# Altium footprint library LQFP.PcbLib: 18 footprints (part 1 of 2)
Each footprint in its own frame and in the unit in brackets; x right, y up, seen from the top. Pads: shape width x height; smd on the part's side, far side on the other; paste and mask are expansions set on the pad; w line width, h text height; cw(c..) or ccw(c..) is an arc to the next point about the centre after c.
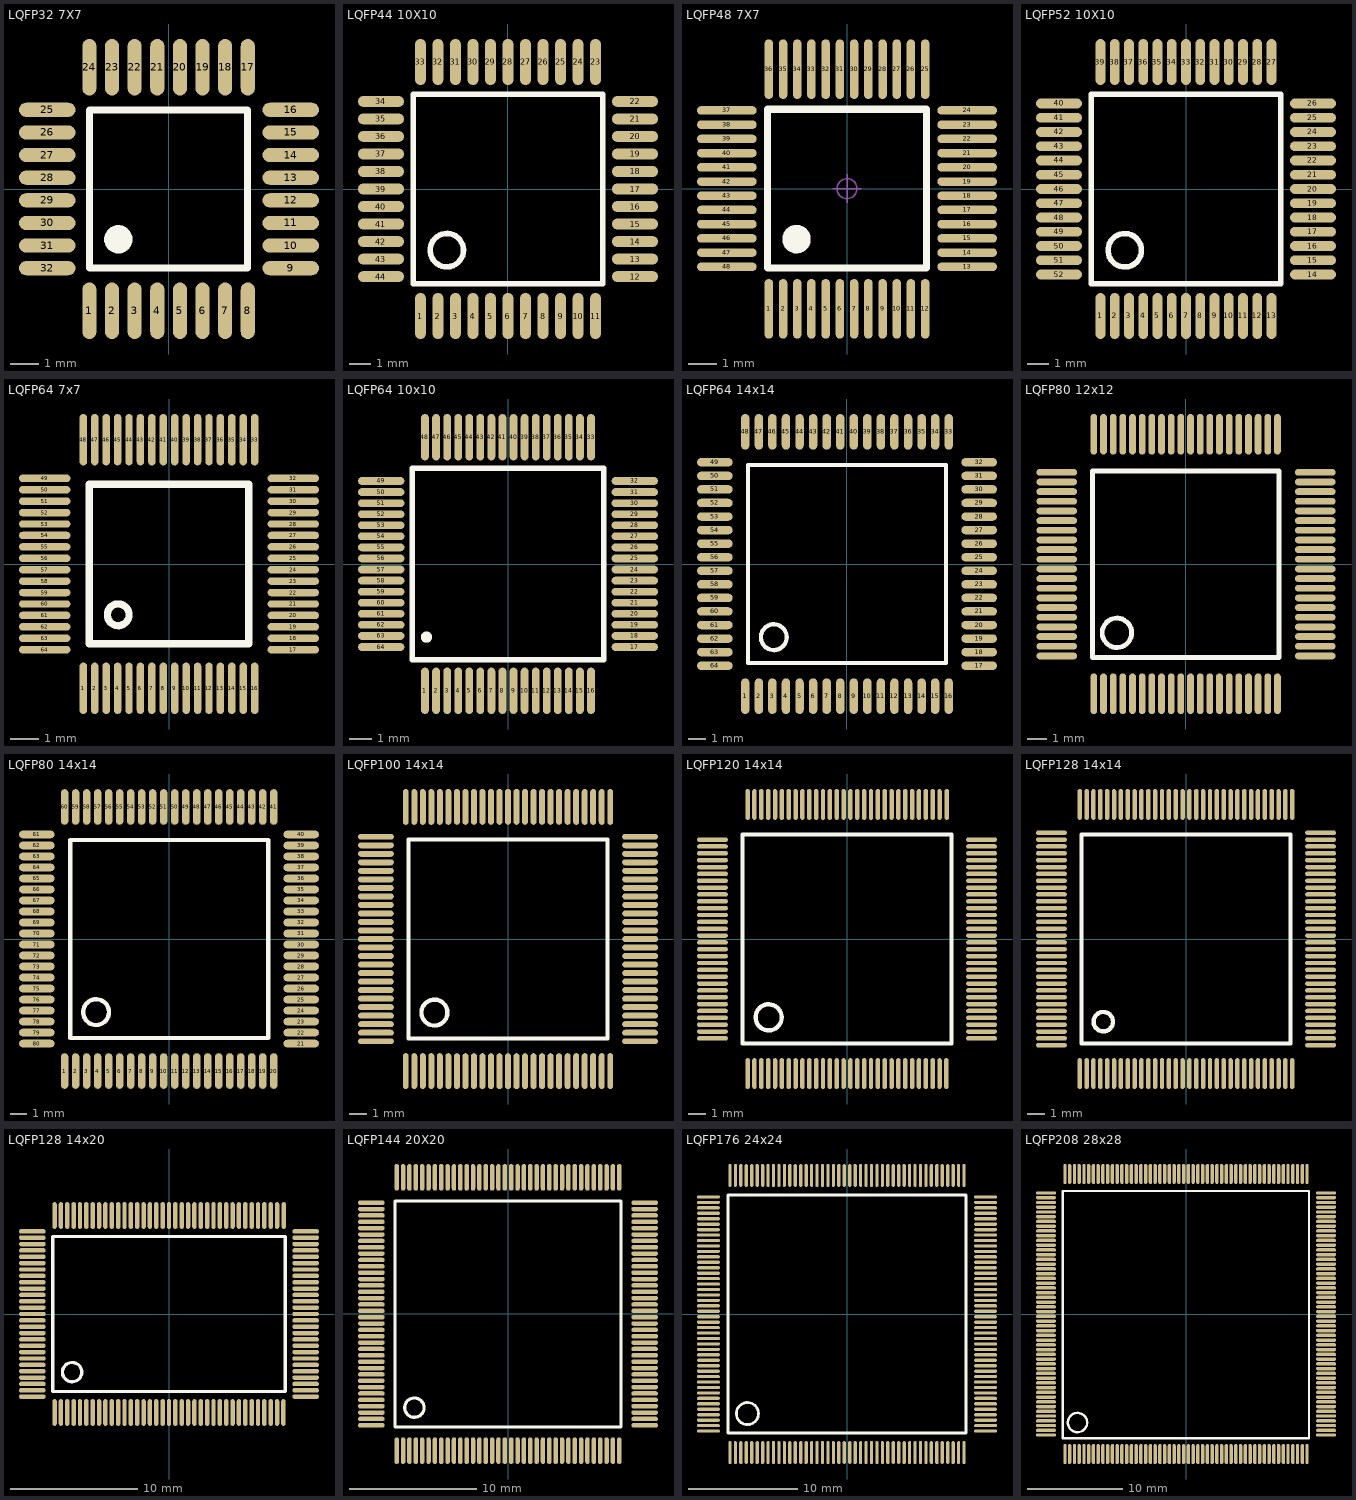
[diagram p0: the footprints below, top view; thin cyan lines are the x and y axes]

## LQFP32 7X7 [mm]
pads (32):
  oval 0.5x2 smd: 1(-2.8,-4.303) 2(-2,-4.303) 3(-1.2,-4.303) 4(-0.4,-4.303) 5(0.4,-4.303) 6(1.2,-4.303) 7(2,-4.303) 8(2.8,-4.303) 17(2.8,4.303) 18(2,4.303) 19(1.2,4.303) 20(0.4,4.303) 21(-0.4,4.303) 22(-1.2,4.303) 23(-2,4.303) 24(-2.8,4.303)
  oval 2x0.5 smd: 9(4.317,-2.8) 10(4.317,-2) 11(4.317,-1.2) 12(4.317,-0.4) 13(4.317,0.4) 14(4.317,1.2) 15(4.317,2) 16(4.317,2.8) 25(-4.289,2.8) 26(-4.289,2) 27(-4.289,1.2) 28(-4.289,0.4) 29(-4.289,-0.4) 30(-4.289,-1.2) 31(-4.289,-2) 32(-4.289,-2.8)
Top Overlay:
  circle w0.5: c-1.778,-1.778 r0.25
  lines w0.254: -2.794,-2.794 -2.794,2.794 2.794,2.794 2.794,-2.794 -2.794,-2.794
3D body "LQFP32 7X7.STEP": height 1.45, standoff 0, extent -4.51,-4.503 4.496,4.503

## LQFP44 10X10 [mm]
pads (44):
  oval 0.5x2.1 smd: 1(-4,-5.8) 2(-3.2,-5.8) 3(-2.4,-5.8) 4(-1.6,-5.8) 5(-0.8,-5.8) 6(0,-5.8) 7(0.8,-5.8) 8(1.6,-5.8) 9(2.4,-5.8) 10(3.2,-5.8) 11(4,-5.8) 23(4,5.8) 24(3.2,5.8) 25(2.4,5.8) 26(1.6,5.8) 27(0.8,5.8) 28(0,5.8) 29(-0.8,5.8) 30(-1.6,5.8) 31(-2.4,5.8) 32(-3.2,5.8) 33(-4,5.8)
  oval 2.1x0.5 smd: 12(5.8,-4) 13(5.8,-3.2) 14(5.8,-2.4) 15(5.8,-1.6) 16(5.8,-0.8) 17(5.8,0) 18(5.8,0.8) 19(5.8,1.6) 20(5.8,2.4) 21(5.8,3.2) 22(5.8,4) 34(-5.8,4) 35(-5.8,3.2) 36(-5.8,2.4) 37(-5.8,1.6) 38(-5.8,0.8) 39(-5.8,0) 40(-5.8,-0.8) 41(-5.8,-1.6) 42(-5.8,-2.4) 43(-5.8,-3.2) 44(-5.8,-4)
Top Overlay:
  circle w0.254: c-2.794,-2.794 r0.762
  lines w0.254: -4.318,-4.318 4.318,-4.318 4.318,4.318 -4.318,4.318 -4.318,-4.318
3D body "LQFP44 10X10.STEP": height 1.45, standoff 0, extent -5.986,-6.003 6.02,6.003

## LQFP48 7X7 [mm]
pads (48):
  oval 0.3x2.1 smd: 1(-2.75,-4.227) 2(-2.25,-4.227) 3(-1.75,-4.227) 4(-1.25,-4.227) 5(-0.75,-4.227) 6(-0.25,-4.227) 7(0.25,-4.227) 8(0.75,-4.227) 9(1.25,-4.227) 10(1.75,-4.227) 11(2.25,-4.227) 12(2.75,-4.227) 25(2.75,4.202) 26(2.25,4.202) 27(1.75,4.202) 28(1.25,4.202) 29(0.75,4.202) 30(0.25,4.202) 31(-0.25,4.202) 32(-0.75,4.202) 33(-1.25,4.202) 34(-1.75,4.202) 35(-2.25,4.202) 36(-2.75,4.202)
  oval 2.1x0.3 smd: 13(4.227,-2.75) 14(4.227,-2.25) 15(4.227,-1.75) 16(4.227,-1.25) 17(4.227,-0.75) 18(4.227,-0.25) 19(4.227,0.25) 20(4.227,0.75) 21(4.227,1.25) 22(4.227,1.75) 23(4.227,2.25) 24(4.227,2.75) 37(-4.227,2.75) 38(-4.227,2.25) 39(-4.227,1.75) 40(-4.227,1.25) 41(-4.227,0.75) 42(-4.227,0.25) 43(-4.227,-0.25) 44(-4.227,-0.75) 45(-4.227,-1.25) 46(-4.227,-1.75) 47(-4.227,-2.25) 48(-4.227,-2.75)
Top Overlay:
  circle w0.5: c-1.778,-1.778 r0.25
  lines w0.254: -2.794,-2.794 2.794,-2.794 2.794,2.794 -2.794,2.794 -2.794,-2.794
Mechanical 15:
  circle w0.05: c0,0 r0.35
  lines w0.05: -0.5,0 0.5,0 ; 0,-0.5 0,0.5
3D body "LQFP48 7X7.STEP": height 1.45, standoff 0, extent -4.51,-4.503 4.496,4.503

## LQFP52 10X10 [mm]
pads (52):
  oval 0.45x2.1 smd: 1(-3.9,-5.791) 2(-3.25,-5.791) 3(-2.6,-5.791) 4(-1.95,-5.791) 5(-1.3,-5.791) 6(-0.65,-5.791) 7(0,-5.791) 8(0.65,-5.791) 9(1.3,-5.791) 10(1.95,-5.791) 11(2.6,-5.791) 12(3.25,-5.791) 13(3.9,-5.791) 27(3.9,5.791) 28(3.25,5.791) 29(2.6,5.791) 30(1.95,5.791) 31(1.3,5.791) 32(0.65,5.791) 33(0,5.791) 34(-0.65,5.791) 35(-1.3,5.791) 36(-1.95,5.791) 37(-2.6,5.791) 38(-3.25,5.791) 39(-3.9,5.791)
  oval 2.1x0.45 smd: 14(5.791,-3.9) 15(5.791,-3.25) 16(5.791,-2.6) 17(5.791,-1.95) 18(5.791,-1.3) 19(5.791,-0.65) 20(5.791,0) 21(5.791,0.65) 22(5.791,1.3) 23(5.791,1.95) 24(5.791,2.6) 25(5.791,3.25) 26(5.791,3.9) 40(-5.791,3.9) 41(-5.791,3.25) 42(-5.791,2.6) 43(-5.791,1.95) 44(-5.791,1.3) 45(-5.791,0.65) 46(-5.791,0) 47(-5.791,-0.65) 48(-5.791,-1.3) 49(-5.791,-1.95) 50(-5.791,-2.6) 51(-5.791,-3.25) 52(-5.791,-3.9)
Top Overlay:
  circle w0.254: c-2.794,-2.794 r0.762
  lines w0.254: -4.318,-4.318 4.318,-4.318 4.318,4.318 -4.318,4.318 -4.318,-4.318
3D body "LQFP52 10X10.STEP": height 1.45, standoff 0, extent -5.986,-6.028 6.02,5.977

## LQFP64 7x7 [mm]
pads (64):
  oval 0.26x1.8 smd: 1(-3,-4.352) 2(-2.6,-4.352) 3(-2.2,-4.352) 4(-1.8,-4.352) 5(-1.4,-4.352) 6(-1,-4.352) 7(-0.6,-4.352) 8(-0.2,-4.352) 9(0.2,-4.352) 10(0.6,-4.352) 11(1,-4.352) 12(1.4,-4.352) 13(1.8,-4.352) 14(2.2,-4.352) 15(2.6,-4.352) 16(3,-4.352) 33(3,4.352) 34(2.6,4.352) 35(2.2,4.352) 36(1.8,4.352) 37(1.4,4.352) 38(1,4.352) 39(0.6,4.352) 40(0.2,4.352) 41(-0.2,4.352) 42(-0.6,4.352) 43(-1,4.352) 44(-1.4,4.352) 45(-1.8,4.352) 46(-2.2,4.352) 47(-2.6,4.352) 48(-3,4.352)
  oval 1.8x0.26 smd: 17(4.352,-3) 18(4.352,-2.6) 19(4.352,-2.2) 20(4.352,-1.8) 21(4.352,-1.4) 22(4.352,-1) 23(4.352,-0.6) 24(4.352,-0.2) 25(4.352,0.2) 26(4.352,0.6) 27(4.352,1) 28(4.352,1.4) 29(4.352,1.8) 30(4.352,2.2) 31(4.352,2.6) 32(4.352,3) 49(-4.352,3) 50(-4.352,2.6) 51(-4.352,2.2) 52(-4.352,1.8) 53(-4.352,1.4) 54(-4.352,1) 55(-4.352,0.6) 56(-4.352,0.2) 57(-4.352,-0.2) 58(-4.352,-0.6) 59(-4.352,-1) 60(-4.352,-1.4) 61(-4.352,-1.8) 62(-4.352,-2.2) 63(-4.352,-2.6) 64(-4.352,-3)
Top Overlay:
  circle w0.254: c-1.778,-1.778 r0.381
  lines w0.254: -2.794,-2.794 -2.794,2.794 2.794,2.794 2.794,-2.794 -2.794,-2.794
3D body "LQFP64 7x7.STEP": height 1.45, standoff 0, extent -4.51,-4.503 4.496,4.503

## LQFP64 10x10 [mm]
pads (64):
  oval 0.35x2.1 smd: 1(-3.75,-5.727) 2(-3.25,-5.727) 3(-2.75,-5.727) 4(-2.25,-5.727) 5(-1.75,-5.727) 6(-1.25,-5.727) 7(-0.75,-5.727) 8(-0.25,-5.727) 9(0.25,-5.727) 10(0.75,-5.727) 11(1.25,-5.727) 12(1.75,-5.727) 13(2.25,-5.727) 14(2.75,-5.727) 15(3.25,-5.727) 16(3.75,-5.727) 33(3.75,5.727) 34(3.25,5.727) 35(2.75,5.727) 36(2.25,5.727) 37(1.75,5.727) 38(1.25,5.727) 39(0.75,5.727) 40(0.25,5.727) 41(-0.25,5.727) 42(-0.75,5.727) 43(-1.25,5.727) 44(-1.75,5.727) 45(-2.25,5.727) 46(-2.75,5.727) 47(-3.25,5.727) 48(-3.75,5.727)
  oval 2.1x0.35 smd: 17(5.727,-3.75) 18(5.727,-3.25) 19(5.727,-2.75) 20(5.727,-2.25) 21(5.727,-1.75) 22(5.727,-1.25) 23(5.727,-0.75) 24(5.727,-0.25) 25(5.727,0.25) 26(5.727,0.75) 27(5.727,1.25) 28(5.727,1.75) 29(5.727,2.25) 30(5.727,2.75) 31(5.727,3.25) 32(5.727,3.75) 49(-5.727,3.75) 50(-5.727,3.25) 51(-5.727,2.75) 52(-5.727,2.25) 53(-5.727,1.75) 54(-5.727,1.25) 55(-5.727,0.75) 56(-5.727,0.25) 57(-5.727,-0.25) 58(-5.727,-0.75) 59(-5.727,-1.25) 60(-5.727,-1.75) 61(-5.727,-2.25) 62(-5.727,-2.75) 63(-5.727,-3.25) 64(-5.727,-3.75)
Top Overlay:
  circle w0.254: c-3.683,-3.302 r0.127
  lines w0.254: -4.318,-4.318 -4.318,4.318 4.318,4.318 4.318,-4.318 -4.318,-4.318
3D body "LQFP64 10x10.STEP": height 1.45, standoff 0, extent -6.003,-5.986 6.003,6.02

## LQFP64 14x14 [mm]
pads (64):
  oval 0.5x2.1 smd: 1(-6,-7.799) 2(-5.2,-7.799) 3(-4.4,-7.799) 4(-3.6,-7.799) 5(-2.8,-7.799) 6(-2,-7.799) 7(-1.2,-7.799) 8(-0.4,-7.799) 9(0.4,-7.799) 10(1.2,-7.799) 11(2,-7.799) 12(2.8,-7.799) 13(3.6,-7.799) 14(4.4,-7.799) 15(5.2,-7.799) 16(6,-7.799) 33(6,7.799) 34(5.2,7.799) 35(4.4,7.799) 36(3.6,7.799) 37(2.8,7.799) 38(2,7.799) 39(1.2,7.799) 40(0.4,7.799) 41(-0.4,7.799) 42(-1.2,7.799) 43(-2,7.799) 44(-2.8,7.799) 45(-3.6,7.799) 46(-4.4,7.799) 47(-5.2,7.799) 48(-6,7.799)
  oval 2.1x0.5 smd: 17(7.799,-6) 18(7.799,-5.2) 19(7.799,-4.4) 20(7.799,-3.6) 21(7.799,-2.8) 22(7.799,-2) 23(7.799,-1.2) 24(7.799,-0.4) 25(7.799,0.4) 26(7.799,1.2) 27(7.799,2) 28(7.799,2.8) 29(7.799,3.6) 30(7.799,4.4) 31(7.799,5.2) 32(7.799,6) 49(-7.799,6) 50(-7.799,5.2) 51(-7.799,4.4) 52(-7.799,3.6) 53(-7.799,2.8) 54(-7.799,2) 55(-7.799,1.2) 56(-7.799,0.4) 57(-7.799,-0.4) 58(-7.799,-1.2) 59(-7.799,-2) 60(-7.799,-2.8) 61(-7.799,-3.6) 62(-7.799,-4.4) 63(-7.799,-5.2) 64(-7.799,-6)
Top Overlay:
  circle w0.254: c-4.318,-4.318 r0.762
  lines w0.254: -5.842,-5.842 -5.842,5.842 5.842,5.842 5.842,-5.842 -5.842,-5.842
3D body "LQFP64 14x14.STEP": height 1.45, standoff 0, extent -8.005,-8.03 8.001,7.976

## LQFP80 12x12 [mm]
pads (80):
  oval 0.35x2.1 smd: 1(-4.75,-6.706) 2(-4.25,-6.706) 3(-3.75,-6.706) 4(-3.25,-6.706) 5(-2.75,-6.706) 6(-2.25,-6.706) 7(-1.75,-6.706) 8(-1.25,-6.706) 9(-0.75,-6.706) 10(-0.25,-6.706) 11(0.25,-6.706) 12(0.75,-6.706) 13(1.25,-6.706) 14(1.75,-6.706) 15(2.25,-6.706) 16(2.75,-6.706) 17(3.25,-6.706) 18(3.75,-6.706) 19(4.25,-6.706) 20(4.75,-6.706) 41(4.75,6.717) 42(4.25,6.717) 43(3.75,6.717) 44(3.25,6.717) 45(2.75,6.717) 46(2.25,6.717) 47(1.75,6.717) 48(1.25,6.717) 49(0.75,6.717) 50(0.25,6.717) 51(-0.25,6.717) 52(-0.75,6.717) 53(-1.25,6.717) 54(-1.75,6.717) 55(-2.25,6.717) 56(-2.75,6.717) 57(-3.25,6.717) 58(-3.75,6.717) 59(-4.25,6.717) 60(-4.75,6.717)
  oval 2.1x0.35 smd: 21(6.706,-4.75) 22(6.706,-4.25) 23(6.706,-3.75) 24(6.706,-3.25) 25(6.706,-2.75) 26(6.706,-2.25) 27(6.706,-1.75) 28(6.706,-1.25) 29(6.706,-0.75) 30(6.706,-0.25) 31(6.706,0.25) 32(6.706,0.75) 33(6.706,1.25) 34(6.706,1.75) 35(6.706,2.25) 36(6.706,2.75) 37(6.706,3.25) 38(6.706,3.75) 39(6.706,4.25) 40(6.706,4.75) 61(-6.67,4.75) 62(-6.67,4.25) 63(-6.67,3.75) 64(-6.67,3.25) 65(-6.67,2.75) 66(-6.67,2.25) 67(-6.67,1.75) 68(-6.67,1.25) 69(-6.67,0.75) 70(-6.67,0.25) 71(-6.67,-0.25) 72(-6.67,-0.75) 73(-6.67,-1.25) 74(-6.67,-1.75) 75(-6.67,-2.25) 76(-6.67,-2.75) 77(-6.67,-3.25) 78(-6.67,-3.75) 79(-6.67,-4.25) 80(-6.67,-4.75)
Top Overlay:
  circle w0.254: c-3.556,-3.556 r0.762
  lines w0.254: -4.826,-4.826 4.826,-4.826 4.826,4.826 -4.826,4.826 -4.826,-4.826
3D body "LQFP80 12x12.STEP": height 1.45, standoff 0, extent -7.003,-6.995 7.003,7.01

## LQFP80 14x14 [mm]
pads (80):
  oval 0.45x2.1 smd: 1(-6.175,-7.797) 2(-5.525,-7.797) 3(-4.875,-7.797) 4(-4.225,-7.797) 5(-3.575,-7.797) 6(-2.925,-7.797) 7(-2.275,-7.797) 8(-1.625,-7.797) 9(-0.975,-7.797) 10(-0.325,-7.797) 11(0.325,-7.797) 12(0.975,-7.797) 13(1.625,-7.797) 14(2.275,-7.797) 15(2.925,-7.797) 16(3.575,-7.797) 17(4.225,-7.797) 18(4.875,-7.797) 19(5.525,-7.797) 20(6.175,-7.797) 41(6.175,7.797) 42(5.525,7.797) 43(4.875,7.797) 44(4.225,7.797) 45(3.575,7.797) 46(2.925,7.797) 47(2.275,7.797) 48(1.625,7.797) 49(0.975,7.797) 50(0.325,7.797) 51(-0.325,7.797) 52(-0.975,7.797) 53(-1.625,7.797) 54(-2.275,7.797) 55(-2.925,7.797) 56(-3.575,7.797) 57(-4.225,7.797) 58(-4.875,7.797) 59(-5.525,7.797) 60(-6.175,7.797)
  oval 2.1x0.45 smd: 21(7.797,-6.175) 22(7.797,-5.525) 23(7.797,-4.875) 24(7.797,-4.225) 25(7.797,-3.575) 26(7.797,-2.925) 27(7.797,-2.275) 28(7.797,-1.625) 29(7.797,-0.975) 30(7.797,-0.325) 31(7.797,0.325) 32(7.797,0.975) 33(7.797,1.625) 34(7.797,2.275) 35(7.797,2.925) 36(7.797,3.575) 37(7.797,4.225) 38(7.797,4.875) 39(7.797,5.525) 40(7.797,6.175) 61(-7.822,6.175) 62(-7.822,5.525) 63(-7.822,4.875) 64(-7.822,4.225) 65(-7.822,3.575) 66(-7.822,2.925) 67(-7.822,2.275) 68(-7.822,1.625) 69(-7.822,0.975) 70(-7.822,0.325) 71(-7.822,-0.325) 72(-7.822,-0.975) 73(-7.822,-1.625) 74(-7.822,-2.275) 75(-7.822,-2.925) 76(-7.822,-3.575) 77(-7.822,-4.225) 78(-7.822,-4.875) 79(-7.822,-5.525) 80(-7.822,-6.175)
Top Overlay:
  circle w0.254: c-4.318,-4.318 r0.762
  lines w0.254: -5.842,-5.842 -5.842,5.842 5.842,5.842 5.842,-5.842 -5.842,-5.842
3D body "LQFP80 14x14.STEP": height 1.45, standoff 0, extent -8.001,-8.005 8.005,8.001

## LQFP100 14x14 [mm]
pads (100):
  oval 0.35x2.1 smd: 1(-6,-7.747) 2(-5.5,-7.747) 3(-5,-7.747) 4(-4.5,-7.747) 5(-4,-7.747) 6(-3.5,-7.747) 7(-3,-7.747) 8(-2.5,-7.747) 9(-2,-7.747) 10(-1.5,-7.747) 11(-1,-7.747) 12(-0.5,-7.747) 13(0,-7.747) 14(0.5,-7.747) 15(1,-7.747) 16(1.5,-7.747) 17(2,-7.747) 18(2.5,-7.747) 19(3,-7.747) 20(3.5,-7.747) 21(4,-7.747) 22(4.5,-7.747) 23(5,-7.747) 24(5.5,-7.747) 25(6,-7.747) 51(6,7.758) 52(5.5,7.758) 53(5,7.758) 54(4.5,7.758) 55(4,7.758) 56(3.5,7.758) 57(3,7.758) 58(2.5,7.758) 59(2,7.758) 60(1.5,7.758) 61(1,7.758) 62(0.5,7.758) 63(0,7.758) 64(-0.5,7.758) 65(-1,7.758) 66(-1.5,7.758) 67(-2,7.758) 68(-2.5,7.758) 69(-3,7.758) 70(-3.5,7.758) 71(-4,7.758) 72(-4.5,7.758) 73(-5,7.758) 74(-5.5,7.758) 75(-6,7.758)
  oval 2.1x0.35 smd: 26(7.752,-5.994) 27(7.752,-5.494) 28(7.752,-4.994) 29(7.752,-4.494) 30(7.752,-3.994) 31(7.752,-3.494) 32(7.752,-2.994) 33(7.752,-2.494) 34(7.752,-1.994) 35(7.752,-1.494) 36(7.752,-0.994) 37(7.752,-0.494) 38(7.752,0.006) 39(7.752,0.506) 40(7.752,1.006) 41(7.752,1.506) 42(7.752,2.006) 43(7.752,2.506) 44(7.752,3.006) 45(7.752,3.506) 46(7.752,4.006) 47(7.752,4.506) 48(7.752,5.006) 49(7.752,5.506) 50(7.752,6.006) 76(-7.752,6.006) 77(-7.752,5.506) 78(-7.752,5.006) 79(-7.752,4.506) 80(-7.752,4.006) 81(-7.752,3.506) 82(-7.752,3.006) 83(-7.752,2.506) 84(-7.752,2.006) 85(-7.752,1.506) 86(-7.752,1.006) 87(-7.752,0.506) 88(-7.752,0.006) 89(-7.752,-0.494) 90(-7.752,-0.994) 91(-7.752,-1.494) 92(-7.752,-1.994) 93(-7.752,-2.494) 94(-7.752,-2.994) 95(-7.752,-3.494) 96(-7.752,-3.994) 97(-7.752,-4.494) 98(-7.752,-4.994) 99(-7.752,-5.494) 100(-7.752,-5.994)
Top Overlay:
  circle w0.254: c-4.318,-4.312 r0.762
  lines w0.254: -5.842,-5.836 -5.842,5.848 5.842,5.848 5.842,-5.836 -5.842,-5.836
3D body "LQFP100 14x14.STEP": height 1.45, standoff 0, extent -8.001,-7.979 8.005,8.026

## LQFP120 14x14 [mm]
pads (120):
  oval 0.26x1.8 smd: 1(-5.8,-7.854) 2(-5.4,-7.854) 3(-5,-7.854) 4(-4.6,-7.854) 5(-4.2,-7.854) 6(-3.8,-7.854) 7(-3.4,-7.854) 8(-3,-7.854) 9(-2.6,-7.854) 10(-2.2,-7.854) 11(-1.8,-7.854) 12(-1.4,-7.854) 13(-1,-7.854) 14(-0.6,-7.854) 15(-0.2,-7.854) 16(0.2,-7.854) 17(0.6,-7.854) 18(1,-7.854) 19(1.4,-7.854) 20(1.8,-7.854) 21(2.2,-7.854) 22(2.6,-7.854) 23(3,-7.854) 24(3.4,-7.854) 25(3.8,-7.854) 26(4.2,-7.854) 27(4.6,-7.854) 28(5,-7.854) 29(5.4,-7.854) 30(5.8,-7.854) 61(5.825,7.854) 62(5.4,7.854) 63(5,7.854) 64(4.6,7.854) 65(4.2,7.854) 66(3.8,7.854) 67(3.4,7.854) 68(3,7.854) 69(2.6,7.854) 70(2.2,7.854) 71(1.8,7.854) 72(1.4,7.854) 73(1,7.854) 74(0.6,7.854) 75(0.2,7.854) 76(-0.2,7.854) 77(-0.6,7.854) 78(-1,7.854) 79(-1.4,7.854) 80(-1.8,7.854) 81(-2.2,7.854) 82(-2.6,7.854) 83(-3,7.854) 84(-3.4,7.854) 85(-3.8,7.854) 86(-4.2,7.854) 87(-4.6,7.854) 88(-5,7.854) 89(-5.4,7.854) 90(-5.8,7.854)
  oval 1.8x0.26 smd: 31(7.854,-5.8) 32(7.854,-5.4) 33(7.854,-5) 34(7.854,-4.6) 35(7.854,-4.2) 36(7.854,-3.8) 37(7.854,-3.4) 38(7.854,-3) 39(7.854,-2.6) 40(7.854,-2.2) 41(7.854,-1.8) 42(7.854,-1.4) 43(7.854,-1) 44(7.854,-0.6) 45(7.854,-0.2) 46(7.854,0.2) 47(7.854,0.6) 48(7.854,1) 49(7.854,1.4) 50(7.854,1.8) 51(7.854,2.2) 52(7.854,2.6) 53(7.854,3) 54(7.854,3.4) 55(7.854,3.8) 56(7.854,4.2) 57(7.854,4.6) 58(7.854,5) 59(7.854,5.4) 60(7.854,5.8) 91(-7.854,5.8) 92(-7.854,5.4) 93(-7.854,5) 94(-7.854,4.6) 95(-7.854,4.2) 96(-7.854,3.8) 97(-7.854,3.4) 98(-7.854,3) 99(-7.854,2.6) 100(-7.854,2.2) 101(-7.854,1.8) 102(-7.854,1.4) 103(-7.854,1) 104(-7.854,0.6) 105(-7.854,0.2) 106(-7.854,-0.2) 107(-7.854,-0.6) 108(-7.854,-1) 109(-7.854,-1.4) 110(-7.854,-1.8) 111(-7.854,-2.2) 112(-7.854,-2.6) 113(-7.854,-3) 114(-7.854,-3.4) 115(-7.854,-3.8) 116(-7.854,-4.2) 117(-7.854,-4.6) 118(-7.854,-5) 119(-7.854,-5.4) 120(-7.854,-5.8)
Top Overlay:
  circle w0.254: c-4.572,-4.572 r0.762
  lines w0.254: -6.096,-6.096 6.096,-6.096 6.096,6.096 -6.096,6.096 -6.096,-6.096
3D body "LQFP120 14x14.STEP": height 1.45, standoff 0, extent -8.001,-8.005 8.005,8.001

## LQFP128 14x14 [mm]
pads (128):
  oval 0.26x1.8 smd: 1(-6.2,-7.854) 2(-5.8,-7.854) 3(-5.4,-7.854) 4(-5,-7.854) 5(-4.6,-7.854) 6(-4.2,-7.854) 7(-3.8,-7.854) 8(-3.4,-7.854) 9(-3,-7.854) 10(-2.6,-7.854) 11(-2.2,-7.854) 12(-1.8,-7.854) 13(-1.4,-7.854) 14(-1,-7.854) 15(-0.6,-7.854) 16(-0.2,-7.854) 17(0.2,-7.854) 18(0.6,-7.854) 19(1,-7.854) 20(1.4,-7.854) 21(1.8,-7.854) 22(2.2,-7.854) 23(2.6,-7.854) 24(3,-7.854) 25(3.4,-7.854) 26(3.8,-7.854) 27(4.2,-7.854) 28(4.6,-7.854) 29(5,-7.854) 30(5.4,-7.854) 31(5.8,-7.854) 32(6.2,-7.854) 65(6.2,7.854) 66(5.8,7.854) 67(5.4,7.854) 68(5,7.854) 69(4.6,7.854) 70(4.2,7.854) 71(3.8,7.854) 72(3.4,7.854) 73(3,7.854) 74(2.6,7.854) 75(2.2,7.854) 76(1.8,7.854) 77(1.4,7.854) 78(1,7.854) 79(0.6,7.854) 80(0.2,7.854) 81(-0.2,7.854) 82(-0.6,7.854) 83(-1,7.854) 84(-1.4,7.854) 85(-1.8,7.854) 86(-2.2,7.854) 87(-2.6,7.854) 88(-3,7.854) 89(-3.4,7.854) 90(-3.8,7.854) 91(-4.2,7.854) 92(-4.6,7.854) 93(-5,7.854) 94(-5.4,7.854) 95(-5.8,7.854) 96(-6.2,7.854)
  oval 1.8x0.26 smd: 33(7.854,-6.2) 34(7.854,-5.8) 35(7.854,-5.4) 36(7.854,-5) 37(7.854,-4.6) 38(7.854,-4.2) 39(7.854,-3.8) 40(7.854,-3.4) 41(7.854,-3) 42(7.854,-2.6) 43(7.854,-2.2) 44(7.854,-1.8) 45(7.854,-1.4) 46(7.854,-1) 47(7.854,-0.6) 48(7.854,-0.2) 49(7.854,0.2) 50(7.854,0.6) 51(7.854,1) 52(7.854,1.4) 53(7.854,1.8) 54(7.854,2.2) 55(7.854,2.6) 56(7.854,3) 57(7.854,3.4) 58(7.854,3.8) 59(7.854,4.2) 60(7.854,4.6) 61(7.854,5) 62(7.854,5.4) 63(7.854,5.8) 64(7.854,6.2) 97(-7.854,6.2) 98(-7.854,5.8) 99(-7.854,5.4) 100(-7.854,5) 101(-7.854,4.6) 102(-7.854,4.2) 103(-7.854,3.8) 104(-7.854,3.4) 105(-7.854,3) 106(-7.854,2.6) 107(-7.854,2.2) 108(-7.854,1.8) 109(-7.854,1.4) 110(-7.854,1) 111(-7.854,0.6) 112(-7.854,0.2) 113(-7.854,-0.2) 114(-7.854,-0.6) 115(-7.854,-1) 116(-7.854,-1.4) 117(-7.854,-1.8) 118(-7.854,-2.2) 119(-7.854,-2.6) 120(-7.854,-3) 121(-7.854,-3.4) 122(-7.854,-3.8) 123(-7.854,-4.2) 124(-7.854,-4.6) 125(-7.854,-5) 126(-7.854,-5.4) 127(-7.854,-5.8) 128(-7.854,-6.2)
Top Overlay:
  circle w0.254: c-4.826,-4.826 r0.568
  lines w0.254: -6.096,-6.096 6.096,-6.096 6.096,6.096 -6.096,6.096 -6.096,-6.096
3D body "LQFP128 14x14.STEP": height 1.45, standoff 0, extent -8.001,-8.005 8.005,8.001

## LQFP128 14x20 [mm]
pads (128):
  oval 0.35x2.1 smd: 1(-9,-7.746) 2(-8.5,-7.746) 3(-8,-7.746) 4(-7.5,-7.746) 5(-7,-7.746) 6(-6.5,-7.746) 7(-6,-7.746) 8(-5.5,-7.746) 9(-5,-7.746) 10(-4.5,-7.746) 11(-4,-7.746) 12(-3.5,-7.746) 13(-3,-7.746) 14(-2.5,-7.746) 15(-2,-7.746) 16(-1.5,-7.746) 17(-1,-7.746) 18(-0.5,-7.746) 19(0,-7.746) 20(0.5,-7.746) 21(1,-7.746) 22(1.5,-7.746) 23(2,-7.746) 24(2.5,-7.746) 25(3,-7.746) 26(3.5,-7.746) 27(4,-7.746) 28(4.5,-7.746) 29(5,-7.746) 30(5.5,-7.746) 31(6,-7.746) 32(6.5,-7.746) 33(7,-7.746) 34(7.5,-7.746) 35(8,-7.746) 36(8.5,-7.746) 37(9,-7.746) 65(9.025,7.746) 66(8.5,7.746) 67(8,7.746) 68(7.5,7.746) 69(7,7.746) 70(6.5,7.746) 71(6,7.746) 72(5.5,7.746) 73(5,7.746) 74(4.5,7.746) 75(4,7.746) 76(3.5,7.746) 77(3,7.746) 78(2.5,7.746) 79(2,7.746) 80(1.5,7.746) 81(1,7.746) 82(0.5,7.746) 83(0,7.746) 84(-0.5,7.746) 85(-1,7.746) 86(-1.5,7.746) 87(-2,7.746) 88(-2.5,7.746) 89(-3,7.746) 90(-3.5,7.746) 91(-4,7.746) 92(-4.5,7.746) 93(-5,7.746) 94(-5.5,7.746) 95(-6,7.746) 96(-6.5,7.746) 97(-7,7.746) 98(-7.5,7.746) 99(-8,7.746) 100(-8.5,7.746) 101(-9,7.746)
  oval 2.1x0.35 smd: 38(10.746,-6.5) 39(10.746,-6) 40(10.746,-5.5) 41(10.746,-5) 42(10.746,-4.5) 43(10.746,-4) 44(10.746,-3.5) 45(10.746,-3) 46(10.746,-2.5) 47(10.746,-2) 48(10.746,-1.5) 49(10.746,-1) 50(10.746,-0.5) 51(10.746,0) 52(10.746,0.5) 53(10.746,1) 54(10.746,1.5) 55(10.746,2) 56(10.746,2.5) 57(10.746,3) 58(10.746,3.5) 59(10.746,4) 60(10.746,4.5) 61(10.746,5) 62(10.746,5.5) 63(10.746,6) 64(10.746,6.5) 102(-10.746,6.5) 103(-10.746,6) 104(-10.746,5.5) 105(-10.746,5) 106(-10.746,4.5) 107(-10.746,4) 108(-10.746,3.5) 109(-10.746,3) 110(-10.746,2.5) 111(-10.746,2) 112(-10.746,1.5) 113(-10.746,1) 114(-10.746,0.5) 115(-10.746,0) 116(-10.746,-0.5) 117(-10.746,-1) 118(-10.746,-1.5) 119(-10.746,-2) 120(-10.746,-2.5) 121(-10.746,-3) 122(-10.746,-3.5) 123(-10.746,-4) 124(-10.746,-4.5) 125(-10.746,-5) 126(-10.746,-5.5) 127(-10.746,-6) 128(-10.746,-6.5)
Top Overlay:
  circle w0.254: c-7.62,-4.572 r0.762
  lines w0.254: -9.144,-6.096 -9.144,6.096 9.144,6.096 9.144,-6.096 -9.144,-6.096
3D body "LQFP128 14x20.STEP": height 1.45, standoff 0, extent -10.998,-8.005 11.007,8.001

## LQFP144 20X20 [mm]
pads (144):
  oval 0.35x2.1 smd: 1(-8.75,-10.747) 2(-8.25,-10.747) 3(-7.75,-10.747) 4(-7.25,-10.747) 5(-6.75,-10.747) 6(-6.25,-10.747) 7(-5.75,-10.747) 8(-5.25,-10.747) 9(-4.75,-10.747) 10(-4.25,-10.747) 11(-3.75,-10.747) 12(-3.25,-10.747) 13(-2.75,-10.747) 14(-2.25,-10.747) 15(-1.75,-10.747) 16(-1.25,-10.747) 17(-0.75,-10.747) 18(-0.25,-10.747) 19(0.25,-10.747) 20(0.75,-10.747) 21(1.25,-10.747) 22(1.75,-10.747) 23(2.25,-10.747) 24(2.75,-10.747) 25(3.25,-10.747) 26(3.75,-10.747) 27(4.25,-10.747) 28(4.75,-10.747) 29(5.25,-10.747) 30(5.75,-10.747) 31(6.25,-10.747) 32(6.75,-10.747) 33(7.25,-10.747) 34(7.75,-10.747) 35(8.25,-10.747) 36(8.75,-10.747) 73(8.75,10.747) 74(8.25,10.747) 75(7.75,10.747) 76(7.25,10.747) 77(6.75,10.747) 78(6.25,10.747) 79(5.75,10.747) 80(5.25,10.747) 81(4.75,10.747) 82(4.25,10.747) 83(3.75,10.747) 84(3.25,10.747) 85(2.75,10.747) 86(2.25,10.747) 87(1.75,10.747) 88(1.25,10.747) 89(0.75,10.747) 90(0.25,10.747) 91(-0.25,10.747) 92(-0.75,10.747) 93(-1.25,10.747) 94(-1.75,10.747) 95(-2.25,10.747) 96(-2.75,10.747) 97(-3.25,10.747) 98(-3.75,10.747) 99(-4.25,10.747) 100(-4.75,10.747) 101(-5.25,10.747) 102(-5.75,10.747) 103(-6.25,10.747) 104(-6.75,10.747) 105(-7.25,10.747) 106(-7.75,10.747) 107(-8.25,10.747) 108(-8.75,10.747)
  oval 2.1x0.35 smd: 37(10.747,-8.75) 38(10.747,-8.25) 39(10.747,-7.75) 40(10.747,-7.25) 41(10.747,-6.75) 42(10.747,-6.25) 43(10.747,-5.75) 44(10.747,-5.25) 45(10.747,-4.75) 46(10.747,-4.25) 47(10.747,-3.75) 48(10.747,-3.25) 49(10.747,-2.75) 50(10.747,-2.25) 51(10.747,-1.75) 52(10.747,-1.25) 53(10.747,-0.75) 54(10.747,-0.25) 55(10.747,0.25) 56(10.747,0.75) 57(10.747,1.25) 58(10.747,1.75) 59(10.747,2.25) 60(10.747,2.75) 61(10.747,3.25) 62(10.747,3.75) 63(10.747,4.25) 64(10.747,4.75) 65(10.747,5.25) 66(10.747,5.75) 67(10.747,6.25) 68(10.747,6.75) 69(10.747,7.25) 70(10.747,7.75) 71(10.747,8.25) 72(10.747,8.75) 109(-10.747,8.75) 110(-10.747,8.25) 111(-10.747,7.75) 112(-10.747,7.25) 113(-10.747,6.75) 114(-10.747,6.25) 115(-10.747,5.75) 116(-10.747,5.25) 117(-10.747,4.75) 118(-10.747,4.25) 119(-10.747,3.75) 120(-10.747,3.25) 121(-10.747,2.75) 122(-10.747,2.25) 123(-10.747,1.75) 124(-10.747,1.25) 125(-10.747,0.75) 126(-10.747,0.25) 127(-10.747,-0.25) 128(-10.747,-0.75) 129(-10.747,-1.25) 130(-10.747,-1.75) 131(-10.747,-2.25) 132(-10.747,-2.75) 133(-10.747,-3.25) 134(-10.747,-3.75) 135(-10.747,-4.25) 136(-10.747,-4.75) 137(-10.747,-5.25) 138(-10.747,-5.75) 139(-10.747,-6.25) 140(-10.747,-6.75) 141(-10.747,-7.25) 142(-10.747,-7.75) 143(-10.747,-8.25) 144(-10.747,-8.75)
Top Overlay:
  circle w0.254: c-7.366,-7.366 r0.762
  lines w0.254: -8.89,-8.892 -8.89,8.89 8.89,8.89 8.89,-8.892 -8.89,-8.892
3D body "LQFP144 20X20.STEP": height 1.45, standoff 0, extent -11.024,-11.003 10.982,11.003

## LQFP176 24x24 [mm]
pads (176):
  oval 0.3x2.1 smd: 1(-10.75,-12.727) 2(-10.25,-12.727) 3(-9.75,-12.727) 4(-9.25,-12.727) 5(-8.75,-12.727) 6(-8.25,-12.727) 7(-7.75,-12.727) 8(-7.25,-12.727) 9(-6.75,-12.727) 10(-6.25,-12.727) 11(-5.75,-12.727) 12(-5.25,-12.727) 13(-4.75,-12.727) 14(-4.25,-12.727) 15(-3.75,-12.727) 16(-3.25,-12.727) 17(-2.75,-12.727) 18(-2.25,-12.727) 19(-1.75,-12.727) 20(-1.25,-12.727) 21(-0.75,-12.727) 22(-0.25,-12.727) 23(0.25,-12.727) 24(0.75,-12.727) 25(1.25,-12.727) 26(1.75,-12.727) 27(2.25,-12.727) 28(2.75,-12.727) 29(3.25,-12.727) 30(3.75,-12.727) 31(4.25,-12.727) 32(4.75,-12.727) 33(5.25,-12.727) 34(5.75,-12.727) 35(6.25,-12.727) 36(6.75,-12.727) 37(7.25,-12.727) 38(7.75,-12.727) 39(8.25,-12.727) 40(8.75,-12.727) 41(9.25,-12.727) 42(9.75,-12.727) 43(10.25,-12.727) 44(10.75,-12.727) 89(10.75,12.727) 90(10.25,12.727) 91(9.75,12.727) 92(9.25,12.727) 93(8.75,12.727) 94(8.25,12.727) 95(7.75,12.727) 96(7.25,12.727) 97(6.75,12.727) 98(6.25,12.727) 99(5.75,12.727) 100(5.25,12.727) 101(4.75,12.727) 102(4.25,12.727) 103(3.75,12.727) 104(3.25,12.727) 105(2.75,12.727) 106(2.25,12.727) 107(1.75,12.727) 108(1.25,12.727) 109(0.75,12.727) 110(0.25,12.727) 111(-0.25,12.727) 112(-0.75,12.727) 113(-1.25,12.727) 114(-1.75,12.727) 115(-2.25,12.727) 116(-2.75,12.727) 117(-3.25,12.727) 118(-3.75,12.727) 119(-4.25,12.727) 120(-4.75,12.727) 121(-5.25,12.727) 122(-5.75,12.727) 123(-6.25,12.727) 124(-6.75,12.727) 125(-7.25,12.727) 126(-7.75,12.727) 127(-8.25,12.727) 128(-8.75,12.727) 129(-9.25,12.727) 130(-9.75,12.727) 131(-10.25,12.727) 132(-10.75,12.727)
  oval 2.1x0.3 smd: 45(12.727,-10.75) 46(12.727,-10.25) 47(12.727,-9.75) 48(12.727,-9.25) 49(12.727,-8.75) 50(12.727,-8.25) 51(12.727,-7.75) 52(12.727,-7.25) 53(12.727,-6.75) 54(12.727,-6.25) 55(12.727,-5.75) 56(12.727,-5.25) 57(12.727,-4.75) 58(12.727,-4.25) 59(12.727,-3.75) 60(12.727,-3.25) 61(12.727,-2.75) 62(12.727,-2.25) 63(12.727,-1.75) 64(12.727,-1.25) 65(12.727,-0.75) 66(12.727,-0.25) 67(12.727,0.25) 68(12.727,0.75) 69(12.727,1.25) 70(12.727,1.75) 71(12.727,2.25) 72(12.727,2.75) 73(12.727,3.25) 74(12.727,3.75) 75(12.727,4.25) 76(12.727,4.75) 77(12.727,5.25) 78(12.727,5.75) 79(12.727,6.25) 80(12.727,6.75) 81(12.727,7.25) 82(12.727,7.75) 83(12.727,8.25) 84(12.727,8.75) 85(12.727,9.25) 86(12.727,9.75) 87(12.727,10.25) 88(12.727,10.75) 133(-12.727,10.75) 134(-12.727,10.25) 135(-12.727,9.75) 136(-12.727,9.25) 137(-12.727,8.75) 138(-12.727,8.25) 139(-12.727,7.75) 140(-12.727,7.25) 141(-12.727,6.75) 142(-12.727,6.25) 143(-12.727,5.75) 144(-12.727,5.25) 145(-12.727,4.75) 146(-12.727,4.25) 147(-12.727,3.75) 148(-12.727,3.25) 149(-12.727,2.75) 150(-12.727,2.25) 151(-12.727,1.75) 152(-12.727,1.25) 153(-12.727,0.75) 154(-12.727,0.25) 155(-12.727,-0.25) 156(-12.727,-0.75) 157(-12.727,-1.25) 158(-12.727,-1.75) 159(-12.727,-2.25) 160(-12.727,-2.75) 161(-12.727,-3.25) 162(-12.727,-3.75) 163(-12.727,-4.25) 164(-12.727,-4.75) 165(-12.727,-5.25) 166(-12.727,-5.75) 167(-12.727,-6.25) 168(-12.727,-6.75) 169(-12.727,-7.25) 170(-12.727,-7.75) 171(-12.727,-8.25) 172(-12.727,-8.75) 173(-12.727,-9.25) 174(-12.727,-9.75) 175(-12.727,-10.25) 176(-12.727,-10.75)
Top Overlay:
  circle w0.254: c-9.144,-9.144 r1.016
  lines w0.254: -10.922,-10.922 10.922,-10.922 10.922,10.922 -10.922,10.922 -10.922,-10.922
3D body "LQFP176 24x24.STEP": height 1.45, standoff 0, extent -13.005,-13.001 13.001,13.005

## LQFP208 28x28 [mm]
pads (208):
  oval 0.35x2.1 smd: 1(-12.75,-14.745) 2(-12.25,-14.745) 3(-11.75,-14.745) 4(-11.25,-14.745) 5(-10.75,-14.745) 6(-10.25,-14.745) 7(-9.75,-14.745) 8(-9.25,-14.745) 9(-8.75,-14.745) 10(-8.25,-14.745) 11(-7.75,-14.745) 12(-7.25,-14.745) 13(-6.75,-14.745) 14(-6.25,-14.745) 15(-5.75,-14.745) 16(-5.25,-14.745) 17(-4.75,-14.745) 18(-4.25,-14.745) 19(-3.75,-14.745) 20(-3.25,-14.745) 21(-2.75,-14.745) 22(-2.25,-14.745) 23(-1.75,-14.745) 24(-1.25,-14.745) 25(-0.75,-14.745) 26(-0.25,-14.745) 27(0.25,-14.745) 28(0.75,-14.745) 29(1.25,-14.745) 30(1.75,-14.745) 31(2.25,-14.745) 32(2.75,-14.745) 33(3.25,-14.745) 34(3.75,-14.745) 35(4.25,-14.745) 36(4.75,-14.745) 37(5.25,-14.745) 38(5.75,-14.745) 39(6.25,-14.745) 40(6.75,-14.745) 41(7.25,-14.745) 42(7.75,-14.745) 43(8.25,-14.745) 44(8.75,-14.745) 45(9.25,-14.745) 46(9.75,-14.745) 47(10.25,-14.745) 48(10.75,-14.745) 49(11.25,-14.745) 50(11.75,-14.745) 51(12.25,-14.745) 52(12.75,-14.745) 105(12.75,14.745) 106(12.25,14.745) 107(11.75,14.745) 108(11.25,14.745) 109(10.75,14.745) 110(10.25,14.745) 111(9.75,14.745) 112(9.25,14.745) 113(8.75,14.745) 114(8.25,14.745) 115(7.75,14.745) 116(7.25,14.745) 117(6.75,14.745) 118(6.25,14.745) 119(5.75,14.745) 120(5.25,14.745) 121(4.75,14.745) 122(4.25,14.745) 123(3.75,14.745) 124(3.25,14.745) 125(2.75,14.745) 126(2.25,14.745) 127(1.75,14.745) 128(1.25,14.745) 129(0.75,14.745) 130(0.25,14.745) 131(-0.25,14.745) 132(-0.75,14.745) 133(-1.25,14.745) 134(-1.75,14.745) 135(-2.25,14.745) 136(-2.75,14.745) 137(-3.25,14.745) 138(-3.75,14.745) 139(-4.25,14.745) 140(-4.75,14.745) 141(-5.25,14.745) 142(-5.75,14.745) 143(-6.25,14.745) 144(-6.75,14.745) 145(-7.25,14.745) 146(-7.75,14.745) 147(-8.25,14.745) 148(-8.75,14.745) 149(-9.25,14.745) 150(-9.75,14.745) 151(-10.25,14.745) 152(-10.75,14.745) 153(-11.25,14.745) 154(-11.75,14.745) 155(-12.25,14.745) 156(-12.75,14.745)
  oval 2.1x0.35 smd: 53(14.745,-12.75) 54(14.745,-12.25) 55(14.745,-11.75) 56(14.745,-11.25) 57(14.745,-10.75) 58(14.745,-10.25) 59(14.745,-9.75) 60(14.745,-9.25) 61(14.745,-8.75) 62(14.745,-8.25) 63(14.745,-7.75) 64(14.745,-7.25) 65(14.745,-6.75) 66(14.745,-6.25) 67(14.745,-5.75) 68(14.745,-5.25) 69(14.745,-4.75) 70(14.745,-4.25) 71(14.745,-3.75) 72(14.745,-3.25) 73(14.745,-2.75) 74(14.745,-2.25) 75(14.745,-1.75) 76(14.745,-1.25) 77(14.745,-0.75) 78(14.745,-0.25) 79(14.745,0.25) 80(14.745,0.75) 81(14.745,1.25) 82(14.745,1.75) 83(14.745,2.25) 84(14.745,2.75) 85(14.745,3.25) 86(14.745,3.75) 87(14.745,4.25) 88(14.745,4.75) 89(14.745,5.25) 90(14.745,5.75) 91(14.745,6.25) 92(14.745,6.75) 93(14.745,7.25) 94(14.745,7.75) 95(14.745,8.25) 96(14.745,8.75) 97(14.745,9.25) 98(14.745,9.75) 99(14.745,10.25) 100(14.745,10.75) 101(14.745,11.25) 102(14.745,11.75) 103(14.745,12.25) 104(14.745,12.75) 157(-14.745,12.75) 158(-14.745,12.25) 159(-14.745,11.75) 160(-14.745,11.25) 161(-14.745,10.75) 162(-14.745,10.25) 163(-14.745,9.75) 164(-14.745,9.25) 165(-14.745,8.75) 166(-14.745,8.25) 167(-14.745,7.75) 168(-14.745,7.25) 169(-14.745,6.75) 170(-14.745,6.25) 171(-14.745,5.75) 172(-14.745,5.25) 173(-14.745,4.75) 174(-14.745,4.25) 175(-14.745,3.75) 176(-14.745,3.25) 177(-14.745,2.75) 178(-14.745,2.25) 179(-14.745,1.75) 180(-14.745,1.25) 181(-14.745,0.75) 182(-14.745,0.25) 183(-14.745,-0.25) 184(-14.745,-0.75) 185(-14.745,-1.25) 186(-14.745,-1.75) 187(-14.745,-2.25) 188(-14.745,-2.75) 189(-14.745,-3.25) 190(-14.745,-3.75) 191(-14.745,-4.25) 192(-14.745,-4.75) 193(-14.745,-5.25) 194(-14.745,-5.75) 195(-14.745,-6.25) 196(-14.745,-6.75) 197(-14.745,-7.25) 198(-14.745,-7.75) 199(-14.745,-8.25) 200(-14.745,-8.75) 201(-14.745,-9.25) 202(-14.745,-9.75) 203(-14.745,-10.25) 204(-14.745,-10.75) 205(-14.745,-11.25) 206(-14.745,-11.75) 207(-14.745,-12.25) 208(-14.745,-12.75)
Top Overlay:
  circle w0.254: c-11.43,-11.43 r1.016
  lines w0.254: -13,-13.081 -13,12.954 12.954,12.954 12.954,-13.081 -13,-13.081
3D body "LQFP208 28x28.STEP": height 1.45, standoff 0, extent -14.986,-15.02 15.02,14.986